# Altium footprint library TitansLib.PcbLib: 333 footprints (part 13 of 21)
Each footprint in its own frame and in the unit in brackets; x right, y up, seen from the top. Pads: shape width x height; smd on the part's side, far side on the other; paste and mask are expansions set on the pad; w line width, h text height; cw(c..) or ccw(c..) is an arc to the next point about the centre after c.
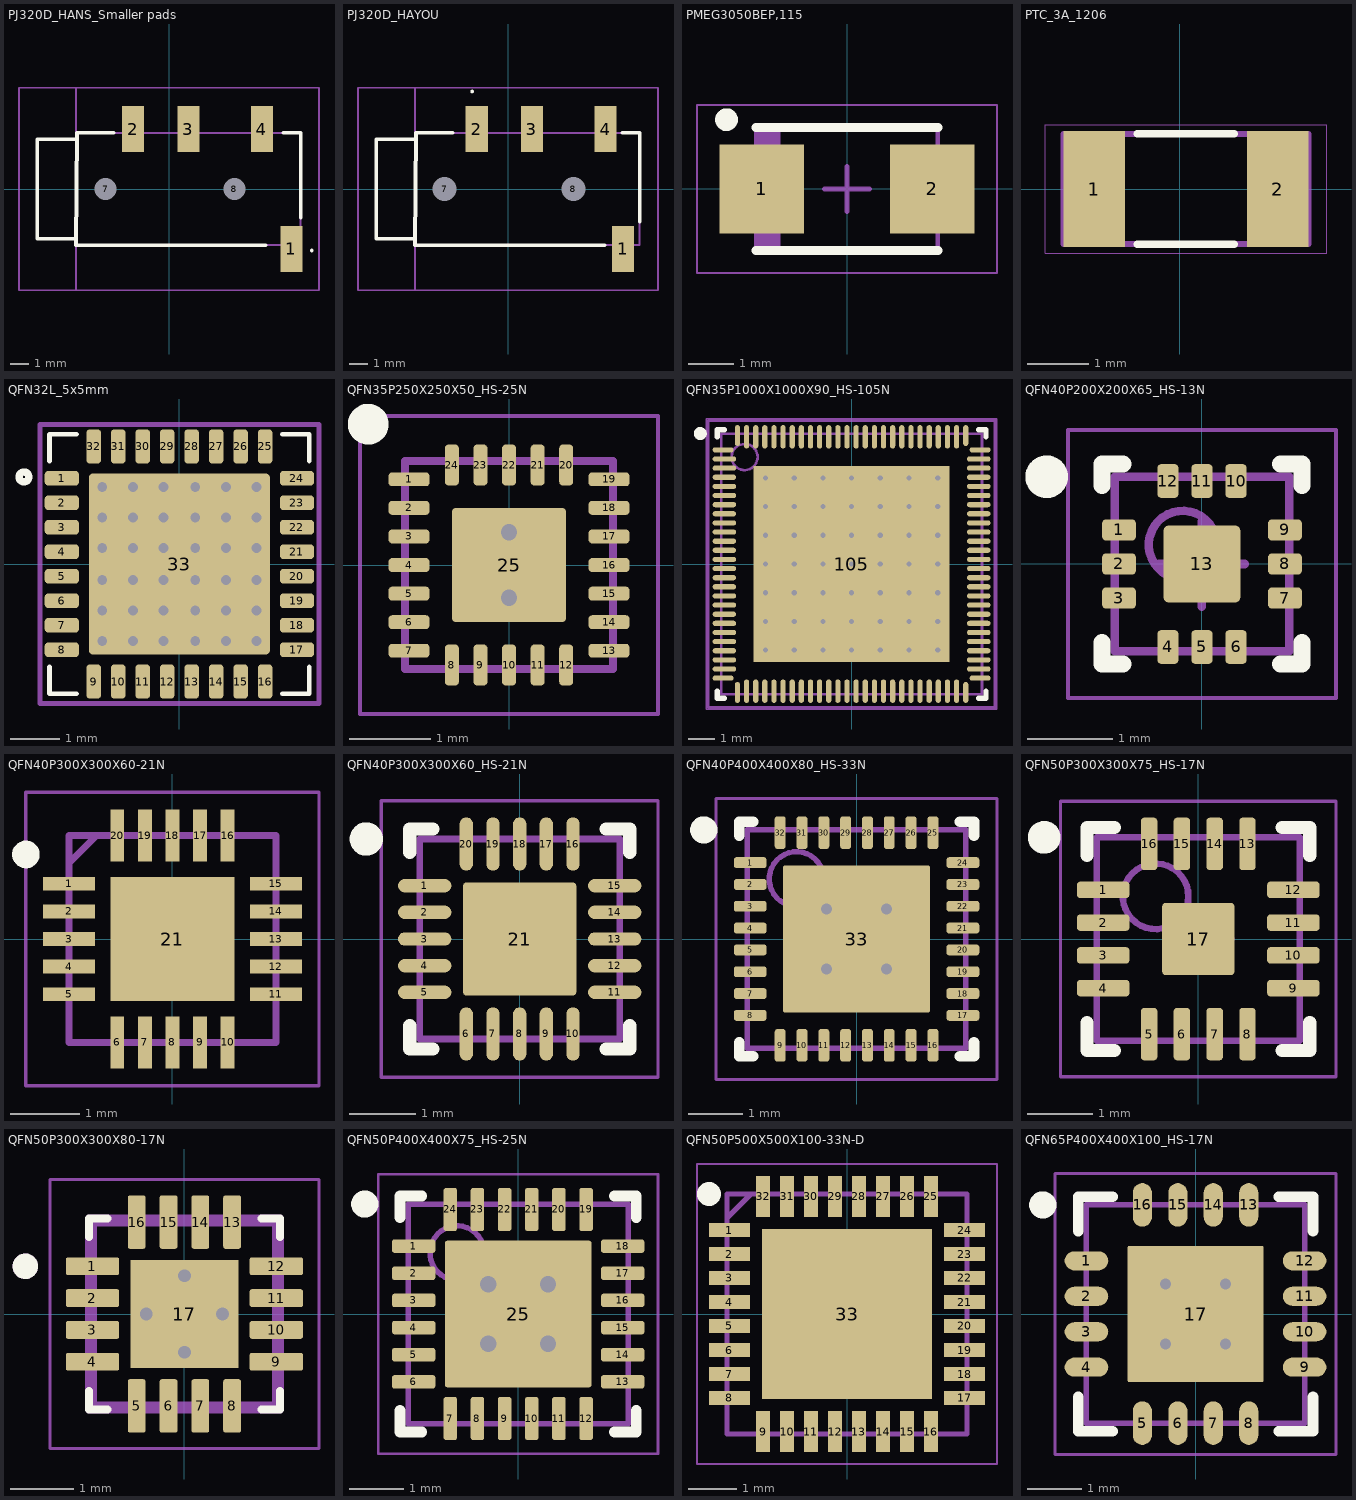
[diagram p12: the footprints below, top view; thin cyan lines are the x and y axes]

## PJ320D_HANS_Smaller pads [mm]
pads (6):
  rect 1.2x2.5 smd: 1(6.65,-3.25) 2(-1.95,3.25) 3(1.05,3.25) 4(5.05,3.25)
  round 0.65 hole 1.2 unplated: 7(-3.45,0) 8(3.55,0)
Top Overlay:
  lines w0.1: 7.747,-3.392 ccw(c7.755,-3.343) 7.755,-3.293 ccw(c7.755,-3.343) 7.755,-3.393
  lines w0.2: -5.05,-2.7 -7.15,-2.7 -7.15,2.7 -5.05,2.7 ; -3,3.05 -5,3.05 -5.05,-3.05 5.25,-3.05 ; 6.223,3.05 7.15,3.05 7.15,-1.55
Mechanical 13:
  lines w0.1: -5.05,-2.7 -7.15,-2.7 -7.15,2.7 -5.05,2.7 ; -5.05,-3.05 -5.05,3.05 7.15,3.05 7.15,-3.05 -5.05,-3.05
Mechanical 15:
  lines w0.1: 8.15,-5.5 -5.05,-5.5 -5.05,5.5 8.15,5.5 ; 8.15,-5.5 8.15,5.5 ; 8.15,-5.5 -8.15,-5.5 -8.15,5.5 8.15,5.5 ; 8.15,-5.5 8.15,5.5
3D body "HanElectricity PJ-320D.step": height 5.02, standoff -0.98, extent -7.149,-4.073 7.151,4.227

## PJ320D_HAYOU [mm]
pads (6):
  rect 1.2x2.5 smd: 1(6.25,-3.25) 2(-1.7,3.25) 3(1.3,3.25) 4(5.3,3.25)
  round 0.65 hole 1.3 unplated: 7(-3.45,0) 8(3.55,0)
Top Overlay:
  lines w0.1: -1.95,5.25 cw(c-1.95,5.3) -1.95,5.35 cw(c-1.95,5.3) -1.95,5.25
  lines w0.2: -5.05,-2.7 -7.15,-2.7 -7.15,2.7 -5.05,2.7 ; -3,3.05 -5,3.05 -5.05,-3.05 5.25,-3.05 ; 6.223,3.05 7.15,3.05 7.15,-1.778
Mechanical 13:
  lines w0.1: -5.05,-2.7 -7.15,-2.7 -7.15,2.7 -5.05,2.7 ; -5.05,-3.05 -5.05,3.05 7.15,3.05 7.15,-3.05 -5.05,-3.05
Mechanical 15:
  lines w0.1: 8.15,-5.5 -5.05,-5.5 -5.05,5.5 8.15,5.5 ; 8.15,-5.5 8.15,5.5 ; 8.15,-5.5 -8.15,-5.5 -8.15,5.5 8.15,5.5 ; 8.15,-5.5 8.15,5.5
3D body "jack.step": height 5, standoff -0.9, extent -6.763,-4.132 7.537,4.068

## PMEG3050BEP,115 [mm] "Molded Diode, 2-Leads, Body 3,80x2,50mm, IPC Low Density"
height 1.1
pads (2):
  rect 1.85x1.95 smd: 1(-1.875,0) 2(1.875,0)
Top Overlay:
  circle w0.25: c-2.65,1.525 r0.125
  lines w0.2: -2,-1.35 2,-1.35 ; -2,1.35 2,1.35
Top Courtyard:
  lines w0.05: -3.3,-1.85 3.3,-1.85 3.3,1.85 -3.3,1.85 -3.3,-1.85
  lines w0.1: -0.5,0 0.5,0 ; 0,-0.5 0,0.5
Top Assembly:
  rectangle: -2,-1.35 -1.462,1.35
  lines w0.1: -2,-1.35 2,-1.35 2,1.35 -2,1.35 -2,-1.35
3D body "Diode_Nexperia_PMEG40T50EPX_eec.STEP": height 0.25, standoff 0, extent -3.1,-1.7 3.1,1.7

## PTC_3A_1206 [mm]
pads (2):
  rect 1x1.9 smd mask+0.05: 1(-1.4,0) 2(1.6,0)
Top Overlay:
  lines w0.12: -0.7,-0.9 0.889,-0.9 ; -0.7,0.9 0.889,0.9
Top Courtyard:
  lines w0.01: -2.2,-1.05 2.4,-1.05 2.4,1.05 -2.2,1.05 -2.2,-1.05
Top Assembly:
  lines w0.1: -1.9,-0.9 -1.9,0.9 2.1,0.9 2.1,-0.9 -1.9,-0.9
  text ".Designator" at -1.15,-0.625 h0.75
3D body "PTSLR12066V300.stp": height 0.68, standoff -0.03, extent -1.473,-0.802 1.727,0.798

## QFN32L_5x5mm [mm] "32 Leads, Body 5.0x5.0mm, Pitch 0.50mm, QFN32L"
height 1
pads (33):
  rrect50% 0.7x0.3 smd mask+0.05: 1(-2.4,1.75) 2(-2.4,1.25) 3(-2.4,0.75) 4(-2.4,0.25) 5(-2.4,-0.25) 6(-2.4,-0.75) 7(-2.4,-1.25) 8(-2.4,-1.75) 17(2.4,-1.75) 18(2.4,-1.25) 19(2.4,-0.75) 20(2.4,-0.25) 21(2.4,0.25) 22(2.4,0.75) 23(2.4,1.25) 24(2.4,1.75)
  rrect50% 0.3x0.7 smd mask+0.05: 9(-1.75,-2.4) 10(-1.25,-2.4) 11(-0.75,-2.4) 12(-0.25,-2.4) 13(0.25,-2.4) 14(0.75,-2.4) 15(1.25,-2.4) 16(1.75,-2.4) 25(1.75,2.4) 26(1.25,2.4) 27(0.75,2.4) 28(0.25,2.4) 29(-0.25,2.4) 30(-0.75,2.4) 31(-1.25,2.4) 32(-1.75,2.4)
  rrect5% 3.7x3.7 smd paste-3.2 mask+0.05: 33(0,0)
via -1.575,-1.575 diameter 0.4 hole 0.2
via 1.575,-1.575 diameter 0.4 hole 0.2
via 0.95,-1.575 diameter 0.4 hole 0.2
via -0.95,-1.575 diameter 0.4 hole 0.2
via 0.325,-1.575 diameter 0.4 hole 0.2
via -0.325,-1.575 diameter 0.4 hole 0.2
via -0.325,-0.95 diameter 0.4 hole 0.2
via 0.325,-0.95 diameter 0.4 hole 0.2
via -0.95,-0.95 diameter 0.4 hole 0.2
via 0.95,-0.95 diameter 0.4 hole 0.2
via 1.575,-0.95 diameter 0.4 hole 0.2
via -1.575,-0.95 diameter 0.4 hole 0.2
via -0.325,-0.325 diameter 0.4 hole 0.2
via 0.325,-0.325 diameter 0.4 hole 0.2
via -0.95,-0.325 diameter 0.4 hole 0.2
via 0.95,-0.325 diameter 0.4 hole 0.2
via 1.575,-0.325 diameter 0.4 hole 0.2
via -1.575,-0.325 diameter 0.4 hole 0.2
via -0.325,0.325 diameter 0.4 hole 0.2
via 0.325,0.325 diameter 0.4 hole 0.2
via -0.95,0.325 diameter 0.4 hole 0.2
via 0.95,0.325 diameter 0.4 hole 0.2
via 1.575,0.325 diameter 0.4 hole 0.2
via -1.575,0.325 diameter 0.4 hole 0.2
via -0.325,0.95 diameter 0.4 hole 0.2
via 0.325,0.95 diameter 0.4 hole 0.2
via -0.95,0.95 diameter 0.4 hole 0.2
via 0.95,0.95 diameter 0.4 hole 0.2
via 1.575,0.95 diameter 0.4 hole 0.2
via -1.575,0.95 diameter 0.4 hole 0.2
via -0.325,1.575 diameter 0.4 hole 0.2
via 0.325,1.575 diameter 0.4 hole 0.2
via -0.95,1.575 diameter 0.4 hole 0.2
via 0.95,1.575 diameter 0.4 hole 0.2
via 1.575,1.575 diameter 0.4 hole 0.2
via -1.575,1.575 diameter 0.4 hole 0.2
Top Overlay:
  circle w0.15: c-3.175,1.778 r0.1
  lines w0.1: -2.65,-2.1 -2.65,-2.65 -2.1,-2.65 ; -2.65,2.1 -2.65,2.65 -2.1,2.65 ; 2.1,-2.65 2.65,-2.65 2.65,-2.1 ; 2.1,2.65 2.65,2.65 2.65,2.1
Top Paste:
  region: -0.55,-0.6 -0.55,-1.7 0.55,-1.7 0.55,-0.6
  region: 0.6,-0.6 0.6,-1.7 1.7,-1.7 1.7,-0.6
  region: -1.7,-0.6 -1.7,-1.7 -0.6,-1.7 -0.6,-0.6
  region: -0.55,0.55 -0.55,-0.55 0.55,-0.55 0.55,0.55
  region: 0.6,0.55 0.6,-0.55 1.7,-0.55 1.7,0.55
  region: -1.7,0.55 -1.7,-0.55 -0.6,-0.55 -0.6,0.55
  region: -1.7,1.7 -1.7,0.6 -0.6,0.6 -0.6,1.7
  region: 0.6,1.7 0.6,0.6 1.7,0.6 1.7,1.7
  region: -0.55,1.7 -0.55,0.6 0.55,0.6 0.55,1.7
Mechanical 15:
  lines w0.1: -2.85,-2.85 -2.85,2.85 2.85,2.85 2.85,-2.85 -2.85,-2.85
3D body: height 1, standoff 0.05, extent -2.5,-2.5 2.5,2.5

## QFN35P250X250X50_HS-25N [mm] "QFN, 24-Leads, Body 2.50x2.50mm, Pitch 0.35mm, Thermal Pad 1.40x1.40mm, IPC Medium Density"
height 0.5
pads (25):
  rrect50% 0.5x0.17 smd mask+0.05: 1(-1.225,1.05) 2(-1.225,0.7) 3(-1.225,0.35) 4(-1.225,0) 5(-1.225,-0.35) 6(-1.225,-0.7) 7(-1.225,-1.05) 13(1.225,-1.05) 14(1.225,-0.7) 15(1.225,-0.35) 16(1.225,0) 17(1.225,0.35) 18(1.225,0.7) 19(1.225,1.05)
  rrect50% 0.17x0.5 smd mask+0.05: 8(-0.7,-1.225) 9(-0.35,-1.225) 10(0,-1.225) 11(0.35,-1.225) 12(0.7,-1.225) 20(0.7,1.225) 21(0.35,1.225) 22(0,1.225) 23(-0.35,1.225) 24(-0.7,1.225)
  rrect7% 1.4x1.4 smd mask+0.05: 25(0,0)
via 0,-0.4 diameter 0.4 hole 0.2
via 0,0.4 diameter 0.4 hole 0.2
Top Overlay:
  circle w0.25: c-1.725,1.725 r0.125
Top Courtyard:
  lines w0.05: -1.825,-1.825 1.825,-1.825 1.825,1.825 -1.825,1.825 -1.825,-1.825
  lines w0.1: -0.5,0 0.5,0 ; 0,-0.5 0,0.5
Top Assembly:
  lines w0.1: -1.275,-1.275 1.275,-1.275 1.275,1.275 -1.275,1.275 -1.275,-1.275
  text ".Designator" at -0.989,-0.236 h1
3D body: height 0.5, standoff 0.05, extent -1.275,-1.275 1.275,1.275

## QFN35P1000X1000X90_HS-105N [mm] "QFN, 104-Leads, Body 10.00x10.00mm, Pitch 0.35mm, Thermal Pad 7.50x7.50mm, IPC Medium Density"
height 0.9
pads (105):
  oval 0.8x0.2 smd mask+0.05: 1(-4.925,4.375) 26(-4.925,-4.375) 53(4.925,-4.375) 78(4.925,4.375)
  oval 0.9x0.2 smd mask+0.05: 2(-4.875,4.025) 3(-4.875,3.675) 4(-4.875,3.325) 5(-4.875,2.975) 6(-4.875,2.625) 7(-4.875,2.275) 8(-4.875,1.925) 9(-4.875,1.575) 10(-4.875,1.225) 11(-4.875,0.875) 12(-4.875,0.525) 13(-4.875,0.175) 14(-4.875,-0.175) 15(-4.875,-0.525) 16(-4.875,-0.875) 17(-4.875,-1.225) 18(-4.875,-1.575) 19(-4.875,-1.925) 20(-4.875,-2.275) 21(-4.875,-2.625) 22(-4.875,-2.975) 23(-4.875,-3.325) 24(-4.875,-3.675) 25(-4.875,-4.025) 54(4.875,-4.025) 55(4.875,-3.675) 56(4.875,-3.325) 57(4.875,-2.975) 58(4.875,-2.625) 59(4.875,-2.275) 60(4.875,-1.925) 61(4.875,-1.575) 62(4.875,-1.225) 63(4.875,-0.875) 64(4.875,-0.525) 65(4.875,-0.175) 66(4.875,0.175) 67(4.875,0.525) 68(4.875,0.875) 69(4.875,1.225) 70(4.875,1.575) 71(4.875,1.925) 72(4.875,2.275) 73(4.875,2.625) 74(4.875,2.975) 75(4.875,3.325) 76(4.875,3.675) 77(4.875,4.025)
  oval 0.2x0.8 smd mask+0.05: 27(-4.375,-4.925) 52(4.375,-4.925) 79(4.375,4.925) 104(-4.375,4.925)
  oval 0.2x0.9 smd mask+0.05: 28(-4.025,-4.875) 29(-3.675,-4.875) 30(-3.325,-4.875) 31(-2.975,-4.875) 32(-2.625,-4.875) 33(-2.275,-4.875) 34(-1.925,-4.875) 35(-1.575,-4.875) 36(-1.225,-4.875) 37(-0.875,-4.875) 38(-0.525,-4.875) 39(-0.175,-4.875) 40(0.175,-4.875) 41(0.525,-4.875) 42(0.875,-4.875) 43(1.225,-4.875) 44(1.575,-4.875) 45(1.925,-4.875) 46(2.275,-4.875) 47(2.625,-4.875) 48(2.975,-4.875) 49(3.325,-4.875) 50(3.675,-4.875) 51(4.025,-4.875) 80(4.025,4.875) 81(3.675,4.875) 82(3.325,4.875) 83(2.975,4.875) 84(2.625,4.875) 85(2.275,4.875) 86(1.925,4.875) 87(1.575,4.875) 88(1.225,4.875) 89(0.875,4.875) 90(0.525,4.875) 91(0.175,4.875) 92(-0.175,4.875) 93(-0.525,4.875) 94(-0.875,4.875) 95(-1.225,4.875) 96(-1.575,4.875) 97(-1.925,4.875) 98(-2.275,4.875) 99(-2.625,4.875) 100(-2.975,4.875) 101(-3.325,4.875) 102(-3.675,4.875) 103(-4.025,4.875)
  rect 7.5x7.5 smd: 105(0,0)
via -3.3,3.3 diameter 0.5 hole 0.2
via -2.2,3.3 diameter 0.5 hole 0.2
via -1.1,3.3 diameter 0.5 hole 0.2
via 0,3.3 diameter 0.5 hole 0.2
via 1.1,3.3 diameter 0.5 hole 0.2
via 2.2,3.3 diameter 0.5 hole 0.2
via 3.3,3.3 diameter 0.5 hole 0.2
via -3.3,2.2 diameter 0.5 hole 0.2
via -2.2,2.2 diameter 0.5 hole 0.2
via -1.1,2.2 diameter 0.5 hole 0.2
via 0,2.2 diameter 0.5 hole 0.2
via 1.1,2.2 diameter 0.5 hole 0.2
via 2.2,2.2 diameter 0.5 hole 0.2
via 3.3,2.2 diameter 0.5 hole 0.2
via -3.3,1.1 diameter 0.5 hole 0.2
via -2.2,1.1 diameter 0.5 hole 0.2
via -1.1,1.1 diameter 0.5 hole 0.2
via 0,1.1 diameter 0.5 hole 0.2
via 1.1,1.1 diameter 0.5 hole 0.2
via 2.2,1.1 diameter 0.5 hole 0.2
via 3.3,1.1 diameter 0.5 hole 0.2
via -3.3,0 diameter 0.5 hole 0.2
via -2.2,0 diameter 0.5 hole 0.2
via -1.1,0 diameter 0.5 hole 0.2
via 0,0 diameter 0.5 hole 0.2
via 1.1,0 diameter 0.5 hole 0.2
via 2.2,0 diameter 0.5 hole 0.2
via 3.3,0 diameter 0.5 hole 0.2
via -3.3,-1.1 diameter 0.5 hole 0.2
via -2.2,-1.1 diameter 0.5 hole 0.2
via -1.1,-1.1 diameter 0.5 hole 0.2
via 0,-1.1 diameter 0.5 hole 0.2
via 1.1,-1.1 diameter 0.5 hole 0.2
via 2.2,-1.1 diameter 0.5 hole 0.2
via 3.3,-1.1 diameter 0.5 hole 0.2
via -3.3,-2.2 diameter 0.5 hole 0.2
via -2.2,-2.2 diameter 0.5 hole 0.2
via -1.1,-2.2 diameter 0.5 hole 0.2
via 0,-2.2 diameter 0.5 hole 0.2
via 1.1,-2.2 diameter 0.5 hole 0.2
via 2.2,-2.2 diameter 0.5 hole 0.2
via 3.3,-2.2 diameter 0.5 hole 0.2
via -3.3,-3.3 diameter 0.5 hole 0.2
via -2.2,-3.3 diameter 0.5 hole 0.2
via -1.1,-3.3 diameter 0.5 hole 0.2
via 0,-3.3 diameter 0.5 hole 0.2
via 1.1,-3.3 diameter 0.5 hole 0.2
via 2.2,-3.3 diameter 0.5 hole 0.2
via 3.3,-3.3 diameter 0.5 hole 0.2
Top Overlay:
  circle w0.25: c-5.8,5 r0.125
  lines w0.2: -5.15,-4.875 -5.15,-5.15 -4.875,-5.15 ; -5.15,4.875 -5.15,5.15 -4.875,5.15 ; 4.875,-5.15 5.15,-5.15 5.15,-4.875 ; 4.875,5.15 5.15,5.15 5.15,4.875
Top Assembly:
  lines w0.1: -5.498,-5.498 5.498,-5.498 5.498,5.498 -5.498,5.498 -5.498,-5.498
  text ".Designator" at -2.425,-0.787 h1
Mechanical 13:
  circle w0.1: c-4.1,4.1 r0.5
  lines w0.1: -5,-5 -5,5 5,5 5,-5 -5,-5
Mechanical 15:
  lines w0.05: -5.575,-5.575 -5.575,5.575 5.575,5.575 5.575,-5.575 -5.575,-5.575
  lines w0.1: -0.5,0 0.5,0 ; 0,-0.5 0,0.5
3D body: height 0.9, standoff 0, extent -5,-5 5,5

## QFN40P200X200X65_HS-13N [mm] "QFN, 12-Leads, Body 2.00x2.00mm, Pitch 0.40mm, Thermal Pad 0.90x0.90mm, IPC Medium Density"
height 0.65
pads (13):
  rrect40% 0.4x0.25 smd mask+0.05: 1(-0.975,0.4) 2(-0.975,0) 3(-0.975,-0.4) 7(0.975,-0.4) 8(0.975,0) 9(0.975,0.4)
  rrect40% 0.25x0.4 smd mask+0.05: 4(-0.4,-0.975) 5(0,-0.975) 6(0.4,-0.975) 10(0.4,0.975) 11(0,0.975) 12(-0.4,0.975)
  rrect11% 0.9x0.9 smd mask+0.05: 13(0,0)
Top Overlay:
  circle w0.25: c-1.825,1.025 r0.125
  lines w0.2: -1.175,-0.925 -1.175,-1.175 -0.925,-1.175 ; -1.175,0.925 -1.175,1.175 -0.925,1.175 ; 0.925,-1.175 1.175,-1.175 1.175,-0.925 ; 0.925,1.175 1.175,1.175 1.175,0.925
Top Courtyard:
  lines w0.05: -1.575,-1.575 -1.575,1.575 1.575,1.575 1.575,-1.575 -1.575,-1.575
  lines w0.1: -0.5,0 0.5,0 ; 0,-0.5 0,0.5
Top Assembly:
  circle w0.1: c-0.225,0.225 r0.4
  lines w0.1: -1.025,-1.025 -1.025,1.025 1.025,1.025 1.025,-1.025 -1.025,-1.025
3D body "QFN40P200X200X65_HS-13N.step": height 0.65, standoff 0, extent -1.075,-1.075 1.075,1.075

## QFN40P300X300X60-21N [mm]
pads (21):
  rect 0.75x0.2 smd: 1(-1.5,0.8) 2(-1.5,0.4) 3(-1.5,0) 4(-1.5,-0.4) 5(-1.5,-0.8) 11(1.5,-0.8) 12(1.5,-0.4) 13(1.5,0) 14(1.5,0.4) 15(1.5,0.8)
  rect 0.2x0.75 smd: 6(-0.8,-1.5) 7(-0.4,-1.5) 8(0,-1.5) 9(0.4,-1.5) 10(0.8,-1.5) 16(0.8,1.5) 17(0.4,1.5) 18(0,1.5) 19(-0.4,1.5) 20(-0.8,1.5)
  rect 1.8x1.8 smd: 21(0,0)
Top Overlay:
  circle w0.2: c-2.125,1.226 r0.1
Mechanical 15:
  lines w0.1: -1.5,1.1 -1.1,1.5 ; -1.5,-1.5 -1.5,1.5 1.5,1.5 1.5,-1.5 -1.5,-1.5
Mechanical 20:
  lines w0.05: -2.125,-2.125 -2.125,2.125 2.125,2.125 2.125,-2.125 -2.125,-2.125
3D body "ES8311.stp": height 0.6, standoff 0, extent -1.549,-1.551 1.551,1.549

## QFN40P300X300X60_HS-21N [mm] "QFN, 20-Leads, Body 3.00x3.00mm, Pitch 0.40mm, Thermal Pad 1.70x1.70mm, IPC Medium Density"
height 0.6
pads (21):
  oval 0.8x0.2 smd mask+0.05: 1(-1.425,0.8) 2(-1.425,0.4) 3(-1.425,0) 4(-1.425,-0.4) 5(-1.425,-0.8) 11(1.425,-0.8) 12(1.425,-0.4) 13(1.425,0) 14(1.425,0.4) 15(1.425,0.8)
  oval 0.2x0.8 smd mask+0.05: 6(-0.8,-1.425) 7(-0.4,-1.425) 8(0,-1.425) 9(0.4,-1.425) 10(0.8,-1.425) 16(0.8,1.425) 17(0.4,1.425) 18(0,1.425) 19(-0.4,1.425) 20(-0.8,1.425)
  rrect6% 1.7x1.7 smd mask+0.05: 21(0,0)
Top Overlay:
  circle w0.25: c-2.3,1.5 r0.125
  lines w0.2: -1.65,-1.3 -1.65,-1.65 -1.3,-1.65 ; -1.65,1.3 -1.65,1.65 -1.3,1.65 ; 1.3,-1.65 1.65,-1.65 1.65,-1.3 ; 1.3,1.65 1.65,1.65 1.65,1.3
Top Courtyard:
  lines w0.05: -2.075,-2.075 -2.075,2.075 2.075,2.075 2.075,-2.075 -2.075,-2.075
  lines w0.1: -0.5,0 0.5,0 ; 0,-0.5 0,0.5
Top Assembly:
  lines w0.1: -1.5,-1.5 -1.5,1.5 1.5,1.5 1.5,-1.5 -1.5,-1.5
  text ".Designator" at -1.378,-0.112 h1
3D body: height 0.6, standoff 0, extent -1.5,-1.5 1.5,1.5

## QFN40P400X400X80_HS-33N [mm] "QFN, 32-Leads, Body 4.00x4.00mm, Pitch 0.40mm, Thermal Pad 2.70x2.70mm, IPC Medium Density"
height 0.8
pads (33):
  rrect50% 0.6x0.2 smd mask+0.05: 1(-1.95,1.4) 2(-1.95,1) 3(-1.95,0.6) 4(-1.95,0.2) 5(-1.95,-0.2) 6(-1.95,-0.6) 7(-1.95,-1) 8(-1.95,-1.4) 17(1.95,-1.4) 18(1.95,-1) 19(1.95,-0.6) 20(1.95,-0.2) 21(1.95,0.2) 22(1.95,0.6) 23(1.95,1) 24(1.95,1.4)
  rrect50% 0.2x0.6 smd mask+0.05: 9(-1.4,-1.95) 10(-1,-1.95) 11(-0.6,-1.95) 12(-0.2,-1.95) 13(0.2,-1.95) 14(0.6,-1.95) 15(1,-1.95) 16(1.4,-1.95) 25(1.4,1.95) 26(1,1.95) 27(0.6,1.95) 28(0.2,1.95) 29(-0.2,1.95) 30(-0.6,1.95) 31(-1,1.95) 32(-1.4,1.95)
  rrect3% 2.7x2.7 smd mask+0.05: 33(0,0)
via 0.55,-0.55 diameter 0.5 hole 0.2
via -0.55,-0.55 diameter 0.5 hole 0.2
via 0.55,0.55 diameter 0.5 hole 0.2
via -0.55,0.55 diameter 0.5 hole 0.2
Top Overlay:
  circle w0.25: c-2.8,2 r0.125
  lines w0.2: -2.15,-1.9 -2.15,-2.15 -1.9,-2.15 ; -2.15,1.9 -2.15,2.15 -1.9,2.15 ; 1.9,-2.15 2.15,-2.15 2.15,-1.9 ; 1.9,2.15 2.15,2.15 2.15,1.9
Top Courtyard:
  lines w0.05: -2.575,-2.575 2.575,-2.575 2.575,2.575 -2.575,2.575 -2.575,-2.575
  lines w0.1: -0.5,0 0.5,0 ; 0,-0.5 0,0.5
Top Assembly:
  circle w0.1: c-1.1,1.1 r0.5
  lines w0.1: -2,-2 2,-2 2,2 -2,2 -2,-2
3D body "QFN40P400X400X80_HS-33N.step": height 0.8, standoff 0, extent -2.08,-2.08 2.08,2.08

## QFN50P300X300X75_HS-17N [mm] "QFN, 16-Leads, Body 3.00x3.00mm, Pitch 0.50mm, Thermal Pad 1.10x1.10mm, IPC Medium Density"
height 0.75
pads (17):
  rrect40% 0.8x0.25 smd mask+0.05: 1(-1.45,0.75) 2(-1.45,0.25) 3(-1.45,-0.25) 4(-1.45,-0.75) 9(1.45,-0.75) 10(1.45,-0.25) 11(1.45,0.25) 12(1.45,0.75)
  rrect40% 0.25x0.8 smd mask+0.05: 5(-0.75,-1.45) 6(-0.25,-1.45) 7(0.25,-1.45) 8(0.75,-1.45) 13(0.75,1.45) 14(0.25,1.45) 15(-0.25,1.45) 16(-0.75,1.45)
  rrect9% 1.1x1.1 smd: 17(0,0)
Top Overlay:
  circle w0.25: c-2.35,1.55 r0.125
  lines w0.2: -1.7,-1.275 -1.7,-1.7 -1.275,-1.7 ; -1.7,1.275 -1.7,1.7 -1.275,1.7 ; 1.275,-1.7 1.7,-1.7 1.7,-1.275 ; 1.275,1.7 1.7,1.7 1.7,1.275
Top Courtyard:
  lines w0.05: -2.1,-2.1 2.1,-2.1 2.1,2.1 -2.1,2.1 -2.1,-2.1
  lines w0.1: -0.5,0 0.5,0 ; 0,-0.5 0,0.5
Top Assembly:
  circle w0.1: c-0.65,0.65 r0.5
  lines w0.1: -1.55,-1.55 1.55,-1.55 1.55,1.55 -1.55,1.55 -1.55,-1.55
3D body "QFN50P300X300X75_HS-17N.step": height 0.75, standoff 0, extent -1.6,-1.6 1.6,1.6

## QFN50P300X300X80-17N [mm]
height 0.8
pads (17):
  rrect25% 0.84x0.28 smd mask+0.075: 1(-1.445,0.75) 2(-1.445,0.25) 3(-1.445,-0.25) 4(-1.445,-0.75) 9(1.445,-0.75) 10(1.445,-0.25) 11(1.445,0.25) 12(1.445,0.75)
  rrect25% 0.28x0.84 smd mask+0.075: 5(-0.75,-1.445) 6(-0.25,-1.445) 7(0.25,-1.445) 8(0.75,-1.445) 13(0.75,1.445) 14(0.25,1.445) 15(-0.25,1.445) 16(-0.75,1.445)
  rect 1.7x1.7 smd paste-0.31 mask+0.075: 17(0,0)
via -0.6,0 diameter 0.4 hole 0.2
via 0,-0.6 diameter 0.4 hole 0.2
via 0.6,0 diameter 0.4 hole 0.2
via 0,0.6 diameter 0.4 hole 0.2
Top Overlay:
  circle w0.2: c-2.5,0.75 r0.1
  lines w0.127: -1.5,-1.21 -1.5,-1.5 -1.21,-1.5 ; -1.5,1.21 -1.5,1.5 -1.21,1.5 ; 1.21,-1.5 1.5,-1.5 1.5,-1.21 ; 1.21,1.5 1.5,1.5 1.5,1.21
Top Assembly:
  lines w0.1: -1.423,-1.423 1.423,-1.423 1.423,1.423 -1.423,1.423 -1.423,-1.423
  text ".Designator" at -1.218,-0.202 h1
Mechanical 13:
  circle w0.2: c-2.5,0.75 r0.1
  lines w0.127: -1.5,-1.5 -1.5,1.5 1.5,1.5 1.5,-1.5 -1.5,-1.5
Mechanical 15:
  lines w0.05: -2.115,-2.115 -2.115,2.115 2.115,2.115 2.115,-2.115 -2.115,-2.115
3D body "step_temp.STEP": height 0.8, standoff 0, extent -1.5,-1.5 1.5,1.5

## QFN50P400X400X75_HS-25N [mm] "QFN, 24-Leads, Body 4.00x4.00mm, Pitch 0.50mm, Thermal Pad 2.70x2.70mm, IPC Medium Density"
height 0.75
pads (25):
  rrect40% 0.8x0.25 smd mask+0.05: 1(-1.925,1.25) 2(-1.925,0.75) 3(-1.925,0.25) 4(-1.925,-0.25) 5(-1.925,-0.75) 6(-1.925,-1.25) 13(1.925,-1.25) 14(1.925,-0.75) 15(1.925,-0.25) 16(1.925,0.25) 17(1.925,0.75) 18(1.925,1.25)
  rrect40% 0.25x0.8 smd mask+0.05: 7(-1.25,-1.925) 8(-0.75,-1.925) 9(-0.25,-1.925) 10(0.25,-1.925) 11(0.75,-1.925) 12(1.25,-1.925) 19(1.25,1.925) 20(0.75,1.925) 21(0.25,1.925) 22(-0.25,1.925) 23(-0.75,1.925) 24(-1.25,1.925)
  rrect3% 2.7x2.7 smd mask+0.05: 25(0,0)
via -0.55,0.55 diameter 0.6 hole 0.3
via 0.55,0.55 diameter 0.6 hole 0.3
via -0.55,-0.55 diameter 0.6 hole 0.3
via 0.55,-0.55 diameter 0.6 hole 0.3
Top Overlay:
  circle w0.25: c-2.825,2.025 r0.125
  lines w0.2: -2.175,-1.775 -2.175,-2.175 -1.775,-2.175 ; -2.175,1.775 -2.175,2.175 -1.775,2.175 ; 1.775,-2.175 2.175,-2.175 2.175,-1.775 ; 1.775,2.175 2.175,2.175 2.175,1.775
Top Courtyard:
  lines w0.05: -2.575,-2.575 -2.575,2.575 2.575,2.575 2.575,-2.575 -2.575,-2.575
  lines w0.1: -0.5,0 0.5,0 ; 0,-0.5 0,0.5
Top Assembly:
  circle w0.1: c-1.125,1.125 r0.5
  lines w0.1: -2.025,-2.025 -2.025,2.025 2.025,2.025 2.025,-2.025 -2.025,-2.025
3D body "QFN50P400X400X75_HS-25N.step": height 0.75, standoff 0, extent -2.075,-2.075 2.075,2.075

## QFN50P500X500X100-33N-D [mm]
pads (33):
  rect 0.85x0.3 smd mask+0.05: 1(-2.45,1.75) 2(-2.45,1.25) 3(-2.45,0.75) 4(-2.45,0.25) 5(-2.45,-0.25) 6(-2.45,-0.75) 7(-2.45,-1.25) 8(-2.45,-1.75) 17(2.45,-1.75) 18(2.45,-1.25) 19(2.45,-0.75) 20(2.45,-0.25) 21(2.45,0.25) 22(2.45,0.75) 23(2.45,1.25) 24(2.45,1.75)
  rect 0.3x0.85 smd mask+0.05: 9(-1.75,-2.45) 10(-1.25,-2.45) 11(-0.75,-2.45) 12(-0.25,-2.45) 13(0.25,-2.45) 14(0.75,-2.45) 15(1.25,-2.45) 16(1.75,-2.45) 25(1.75,2.45) 26(1.25,2.45) 27(0.75,2.45) 28(0.25,2.45) 29(-0.25,2.45) 30(-0.75,2.45) 31(-1.25,2.45) 32(-1.75,2.45)
  rect 3.55x3.55 smd: 33(0,0)
Top Overlay:
  circle w0.25: c-2.875,2.5 r0.125
Mechanical 13:
  lines w0.1: -2.5,2 -2,2.5 ; -2.5,-2.5 -2.5,2.5 2.5,2.5 2.5,-2.5 -2.5,-2.5
Mechanical 15:
  lines w0.05: -3.125,-3.125 -3.125,3.125 3.125,3.125 3.125,-3.125 -3.125,-3.125
3D body "TLV320DAC3100IRHBT.stp": height 1, standoff 0, extent -2.5,-2.49 2.5,2.51

## QFN65P400X400X100_HS-17N [mm] "QFN, 16-Leads, Body 4.00x4.00mm, Pitch 0.65mm, Thermal Pad 2.65x2.65mm, IPC Medium Density"
height 1
pads (17):
  oval 0.8x0.35 smd mask+0.05: 1(-2,0.975) 2(-2,0.325) 3(-2,-0.325) 4(-2,-0.975) 9(2,-0.975) 10(2,-0.325) 11(2,0.325) 12(2,0.975)
  oval 0.35x0.8 smd mask+0.05: 5(-0.975,-2) 6(-0.325,-2) 7(0.325,-2) 8(0.975,-2) 13(0.975,2) 14(0.325,2) 15(-0.325,2) 16(-0.975,2)
  rrect3% 2.5x2.5 smd: 17(0,0)
via 0.55,-0.55 diameter 0.5 hole 0.2
via -0.55,-0.55 diameter 0.5 hole 0.2
via 0.55,0.55 diameter 0.5 hole 0.2
via -0.55,0.55 diameter 0.5 hole 0.2
Top Overlay:
  circle w0.25: c-2.8,2 r0.125
  lines w0.2: -2.15,-1.525 -2.15,-2.15 -1.525,-2.15 ; -2.15,1.525 -2.15,2.15 -1.525,2.15 ; 1.525,-2.15 2.15,-2.15 2.15,-1.525 ; 1.525,2.15 2.15,2.15 2.15,1.525
Top Courtyard:
  lines w0.05: -2.575,-2.575 2.575,-2.575 2.575,2.575 -2.575,2.575 -2.575,-2.575
  lines w0.1: -0.5,0 0.5,0 ; 0,-0.5 0,0.5
Top Assembly:
  lines w0.1: -2,-2 2,-2 2,2 -2,2 -2,-2
  text ".Designator" at -1.604,-0.1 h1
3D body "QFN65P400X400X100_HS-17N.step": height 1, standoff 0, extent -2.05,-2.05 2.05,2.05